# Altium footprint library stm32f446re_footprint.PcbLib: 1 footprints
Each footprint in its own frame and in the unit in brackets; x right, y up, seen from the top. Pads: shape width x height; smd on the part's side, far side on the other; paste and mask are expansions set on the pad; w line width, h text height; cw(c..) or ccw(c..) is an arc to the next point about the centre after c.
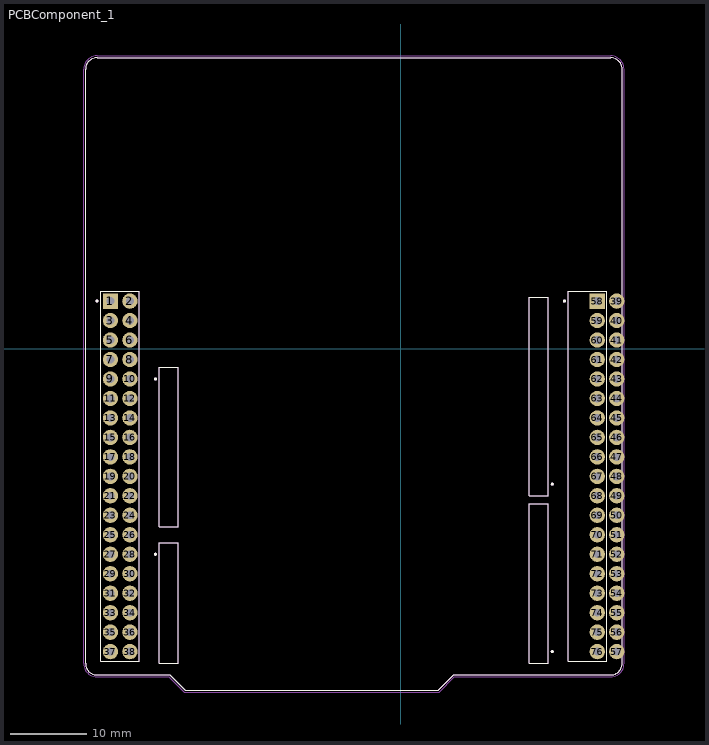
[diagram p0: the footprint, top view; thin cyan lines are the x and y axes]

## PCBComponent_1 [mm]
pads (76):
  rect 2x2 hole 1.02: 1(-37.846,6.223) 58(25.654,6.223)
  round 2 hole 1.02: 2(-35.306,6.223) 3(-37.846,3.683) 4(-35.306,3.683) 5(-37.846,1.143) 6(-35.306,1.143) 7(-37.846,-1.397) 8(-35.306,-1.397) 9(-37.846,-3.937) 10(-35.306,-3.937) 11(-37.846,-6.477) 12(-35.306,-6.477) 13(-37.846,-9.017) 14(-35.306,-9.017) 15(-37.846,-11.557) 16(-35.306,-11.557) 17(-37.846,-14.097) 18(-35.306,-14.097) 19(-37.846,-16.637) 20(-35.306,-16.637) 21(-37.846,-19.177) 22(-35.306,-19.177) 23(-37.846,-21.717) 24(-35.306,-21.717) 25(-37.846,-24.257) 26(-35.306,-24.257) 27(-37.846,-26.797) 28(-35.306,-26.797) 29(-37.846,-29.337) 30(-35.306,-29.337) 31(-37.846,-31.877) 32(-35.306,-31.877) 33(-37.846,-34.417) 34(-35.306,-34.417) 35(-37.846,-36.957) 36(-35.306,-36.957) 37(-37.846,-39.497) 38(-35.306,-39.497) 39(28.194,6.223) 40(28.194,3.683) 41(28.194,1.143) 42(28.194,-1.397) 43(28.194,-3.937) 44(28.194,-6.477) 45(28.194,-9.017) 46(28.194,-11.557) 47(28.194,-14.097) 48(28.194,-16.637) 49(28.194,-19.177) 50(28.194,-21.717) 51(28.194,-24.257) 52(28.194,-26.797) 53(28.194,-29.337) 54(28.194,-31.877) 55(28.194,-34.417) 56(28.194,-36.957) 57(28.194,-39.497) 59(25.654,3.683) 60(25.654,1.143) 61(25.654,-1.397) 62(25.654,-3.937) 63(25.654,-6.477) 64(25.654,-9.017) 65(25.654,-11.557) 66(25.654,-14.097) 67(25.654,-16.637) 68(25.654,-19.177) 69(25.654,-21.717) 70(25.654,-24.257) 71(25.654,-26.797) 72(25.654,-29.337) 73(25.654,-31.877) 74(25.654,-34.417) 75(25.654,-36.957) 76(25.654,-39.497)
Top Overlay:
  circle w0.2: c-31.976,-3.937 r0.1
  circle w0.2: c19.784,-39.497 r0.1
  circle w0.2: c-31.976,-26.797 r0.1
  circle w0.2: c19.784,-17.657 r0.1
  circle w0.2: c-39.596,6.223 r0.1
  circle w0.2: c21.364,6.223 r0.1
  lines w0.127: -41.096,-41.037 ccw(c-39.596,-41.037) -39.596,-42.537 -30.096,-42.537 -28.096,-44.537 4.904,-44.537 6.904,-42.537 27.404,-42.537 ccw(c27.404,-41.037) 28.904,-41.037 28.904,36.463 ccw(c27.404,36.463) 27.404,37.963 -39.596,37.963 ccw(c-39.596,36.463) -41.096,36.463 -41.096,-41.037 ; -39.076,-40.767 -39.076,7.493 -34.076,7.493 -34.076,-40.767 -39.076,-40.767 ; -31.476,-41.017 -31.476,-25.277 -28.976,-25.277 -28.976,-41.017 -31.476,-41.017 ; -31.476,-23.237 -31.476,-2.417 -28.976,-2.417 -28.976,-23.237 -31.476,-23.237 ; 16.784,-41.017 16.784,-20.197 19.284,-20.197 19.284,-41.017 16.784,-41.017 ; 16.784,-19.177 16.784,6.723 19.284,6.723 19.284,-19.177 16.784,-19.177 ; 21.884,-40.767 21.884,7.493 26.884,7.493 26.884,-40.767 21.884,-40.767
Mechanical 13:
  circle w0.2: c-31.976,-3.937 r0.1
  circle w0.2: c19.784,-39.497 r0.1
  circle w0.2: c-31.976,-26.797 r0.1
  circle w0.2: c19.784,-17.657 r0.1
  circle w0.2: c-39.596,6.223 r0.1
  circle w0.2: c21.364,6.223 r0.1
  lines w0.127: -41.096,-41.037 ccw(c-39.596,-41.037) -39.596,-42.537 -30.096,-42.537 -28.096,-44.537 4.904,-44.537 6.904,-42.537 27.404,-42.537 ccw(c27.404,-41.037) 28.904,-41.037 28.904,36.463 ccw(c27.404,36.463) 27.404,37.963 -39.596,37.963 ccw(c-39.596,36.463) -41.096,36.463 -41.096,-41.037 ; -39.076,-40.767 -39.076,7.493 -34.076,7.493 -34.076,-40.767 -39.076,-40.767 ; -31.476,-41.017 -31.476,-25.277 -28.976,-25.277 -28.976,-41.017 -31.476,-41.017 ; -31.476,-23.237 -31.476,-2.417 -28.976,-2.417 -28.976,-23.237 -31.476,-23.237 ; 16.784,-41.017 16.784,-20.197 19.284,-20.197 19.284,-41.017 16.784,-41.017 ; 16.784,-19.177 16.784,6.723 19.284,6.723 19.284,-19.177 16.784,-19.177 ; 21.884,-40.767 21.884,7.493 26.884,7.493 26.884,-40.767 21.884,-40.767
Mechanical 15:
  lines w0.05: -41.346,-41.037 ccw(c-39.596,-41.037) -39.596,-42.787 -30.221,-42.787 -28.221,-44.787 5.029,-44.787 7.029,-42.787 27.404,-42.787 ccw(c27.404,-41.037) 29.154,-41.037 29.154,36.463 ccw(c27.404,36.463) 27.404,38.213 -39.596,38.213 ccw(c-39.596,36.463) -41.346,36.463 -41.346,-41.037
3D body "step_temp.STEP": height 12.28, standoff -8.42, extent -41.096,-44.537 28.904,39.413